# Altium integrated library BZT52C3V3_RHG.IntLib: 1 symbol
Pins are listed as number, name and electrical type; pins without a type are passive.

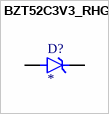
[diagram p0: symbol BZT52C3V3_RHG]

## BZT52C3V3_RHG
designator D?
MP: BZT52C3V3_RHG; Package: None; Price: None; Value: *; Availability: Unavailable
footprint DIO_BZT52C3V3_RHG
pins: A, C K